# Altium schematic symbol library CL21A225KAFNNNE.SchLib: 1 symbol
Pins are listed as number, name and electrical type; pins without a type are passive.

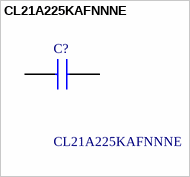
[diagram p0: symbol CL21A225KAFNNNE]

## CL21A225KAFNNNE
designator C?
Cap Ceramic 2.2uF 25V X5R 10% Pad SMD 0805 85C T/R; Manufacturer_Name: SAMSUNG; Geometry.Height: 1.35mm; Manufacturer_Part_Number: CL21A225KAFNNNE; Mouser Part Number: 187-CL21A225KAFNNNE; Mouser Price/Stock: https://www.mouser.co.uk/ProductDetail/Samsung-Electro-Mechanics/CL21A225KAFNNNE?qs=AQlKX63v8RsYYvlxb7IKiQ%3D%3D; Arrow Part Number: CL21A225KAFNNNE; Arrow Price/Stock: https://www.arrow.com/en/products/cl21a225kafnnne/samsung-electro-mechanics?region=europe; Datasheet Link: https://www.arrow.com/en/products/cl21a225kafnnne/samsung-electro-mechanics
footprint CAPC2012X135N
pins: 1, 2